# Altium footprint library custom-case.PcbLib: 342 footprints (part 6 of 22)
Each footprint in its own frame and in the unit in brackets; x right, y up, seen from the top. Pads: shape width x height; smd on the part's side, far side on the other; paste and mask are expansions set on the pad; w line width, h text height; cw(c..) or ccw(c..) is an arc to the next point about the centre after c.
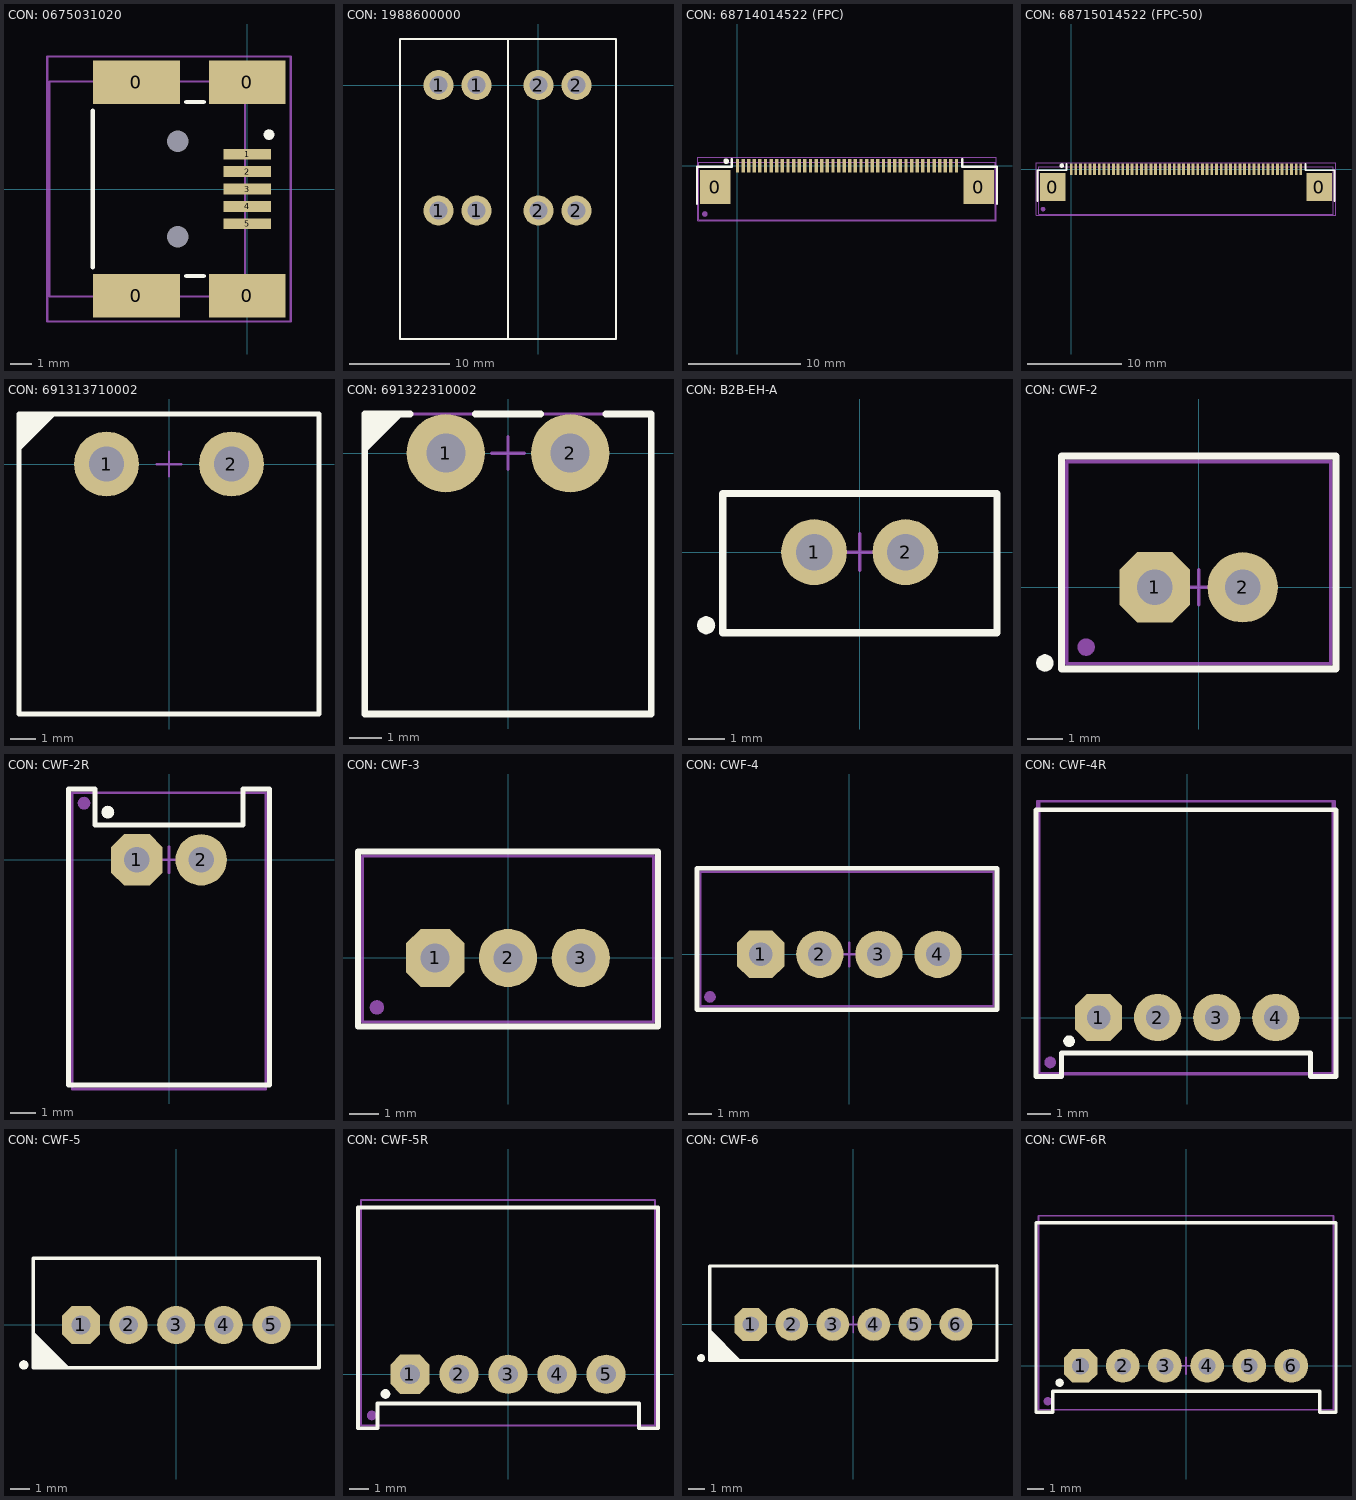
[diagram p5: the footprints below, top view; thin cyan lines are the x and y axes]

## CON: 0675031020 [mm]
pads (13):
  rect 4x2 smd: 0(-5.1,-4.9) 0(-5.1,4.9)
  rect 3.5x2 smd: 0(0,-4.9) 0(0,4.9)
  rect 2.2x0.5 smd: 1(0,1.6) 2(0,0.8) 3(0,0) 4(0,-0.8) 5(0,-1.6)
  round 0 hole 1: ""(-3.2,-2.2) ""(-3.2,2.2)
  round 0.5 on Mech1: ""(-0.6,4.5)
  round 0.5 on Top Overlay: ""(1,2.5)
Top Overlay:
  lines w0.2: -7.1,-3.6 -7.1,3.6 ; -2.8,-4 -2,-4 ; -2.8,4 -2,4
Top Assy:
  lines w0.1: -9.1,-4.95 -0.1,-4.95 -0.1,4.95 -9.1,4.95 -9.1,-4.95
Size Area:
  lines w0.1: -9.2,-6.1 2,-6.1 2,6.1 -9.2,6.1 -9.2,-6.1
3D body "675031020.stp": height 3.95, standoff -1, extent -9.1,-4.95 -0.1,4.95

## CON: 1988600000 [mm]
pads (8):
  round 3 hole 1.8: 1(-9.95,-12.5) 1(-9.95,0) 1(-6.15,-12.5) 1(-6.15,0) 2(0,-12.5) 2(0,0) 2(3.8,-12.5) 2(3.8,0)
Top Overlay:
  lines w0.2: -3.025,-25.3 -3.025,4.602 ; -13.812,-25.3 -13.812,4.602 7.762,4.602 7.762,-25.3 -13.812,-25.3
Top Assy:
  lines w0.1: -3.025,-25.3 -3.025,4.602 ; -13.812,-25.3 7.762,-25.3 7.762,4.602 -13.812,4.602 -13.812,-25.3
Size Area:
  lines w0.1: -13.812,-25.3 7.762,-25.3 7.762,4.602 -13.812,4.602 -13.812,-25.3
3D body "1988600000.stp": height 41.24, standoff -5, extent -13.812,-25.3 7.762,4.602

## CON: 68714014522 (FPC) [mm]
pads (44):
  rect 2.7x3 smd: 0(-1.975,-1.9) 0(21.475,-1.9)
  rect 0.3x1.2 smd: 1(0,0) 2(0.5,0) 3(1,0) 4(1.5,0) 5(2,0) 6(2.5,0) 7(3,0) 8(3.5,0) 9(4,0) 10(4.5,0) 11(5,0) 12(5.5,0) 13(6,0) 14(6.5,0) 15(7,0) 16(7.5,0) 17(8,0) 18(8.5,0) 19(9,0) 20(9.5,0) 21(10,0) 22(10.5,0) 23(11,0) 24(11.5,0) 25(12,0) 26(12.5,0) 27(13,0) 28(13.5,0) 29(14,0) 30(14.5,0) 31(15,0) 32(15.5,0) 33(16,0) 34(16.5,0) 35(17,0) 36(17.5,0) 37(18,0) 38(18.5,0) 39(19,0) 40(19.5,0)
  round 0.5 on Mech1: ""(-2.9,-4.3)
  round 0.5 on Top Overlay: ""(-1,0.4)
Top Overlay:
  lines w0.2: -3.6,-3.4 -3.6,-0.1 -0.5,-0.1 -0.5,0.6 ; 20,0.6 20,-0.1 23.1,-0.1 23.1,-3.4
Top Assy:
  lines w0.1: -3.45,-4.8 -3.45,0.3 22.95,0.3 22.95,-4.8 -3.45,-4.8
Size Area:
  lines w0.1: -3.55,-4.9 -3.55,0.75 23.05,0.75 23.05,-4.9 -3.55,-4.9
3D body "68714014522 (rev1).stp": height 2.1, standoff 0, extent -3.45,-4.8 22.95,0.3

## CON: 68715014522 (FPC-50) [mm]
pads (54):
  rect 2.7x3 smd: 0(-1.975,-1.9) 0(26.475,-1.9)
  rect 0.3x1.2 smd: 1(0,0) 2(0.5,0) 3(1,0) 4(1.5,0) 5(2,0) 6(2.5,0) 7(3,0) 8(3.5,0) 9(4,0) 10(4.5,0) 11(5,0) 12(5.5,0) 13(6,0) 14(6.5,0) 15(7,0) 16(7.5,0) 17(8,0) 18(8.5,0) 19(9,0) 20(9.5,0) 21(10,0) 22(10.5,0) 23(11,0) 24(11.5,0) 25(12,0) 26(12.5,0) 27(13,0) 28(13.5,0) 29(14,0) 30(14.5,0) 31(15,0) 32(15.5,0) 33(16,0) 34(16.5,0) 35(17,0) 36(17.5,0) 37(18,0) 38(18.5,0) 39(19,0) 40(19.5,0) 41(20,0) 42(20.5,0) 43(21,0) 44(21.5,0) 45(22,0) 46(22.5,0) 47(23,0) 48(23.5,0) 49(24,0) 50(24.5,0)
  round 0.5 on Mech1: ""(-3,-4.25)
  round 0.5 on Top Overlay: ""(-1,0.4)
Top Overlay:
  lines w0.2: -3.6,-3.4 -3.6,-0.1 -0.5,-0.1 -0.5,0.6 ; 25,0.6 25,-0.1 28.1,-0.1 28.1,-3.4
Top Assy:
  lines w0.1: -3.45,-4.8 27.95,-4.8 27.95,0.3 -3.45,0.3 -3.45,-4.8
Size Area:
  lines w0.1: -3.75,-4.9 -3.75,0.7 28.25,0.7 28.25,-4.9 -3.75,-4.9
3D body "68715014522 (rev1).stp": height 2.1, standoff 0, extent -3.45,-4.8 27.95,0.3

## CON: 691313710002 [mm]
pads (2):
  round 2.6 hole 1.4 mask+0.075: 1(-2.5,0) 2(2.5,0)
Top Overlay:
  region: -6,0.5 -4.5,2 -6,2
  lines w0.2: -6,-10 -6,2 6,2 6,-10 -6,-10
Top Assy:
  lines w0.1: -6,-10 -6,2 6,2 6,-10 -6,-10
Size Area:
  lines w0.1: -0.5,0 0.5,0 ; 0,-0.5 0,0.5 ; -6,-10 -6,2 6,2 6,-10 -6,-10
3D body "691313710002 (rev1).stp": height 9.25, standoff -2.75, extent -6,-10 6,2

## CON: 691322310002 [mm]
pads (2):
  round 2.4 hole 1.2 mask+0.075: 1(-1.905,0) 2(1.905,0)
Top Overlay:
  region: -4.4,0 -3.2,1.2 -4.4,1.2
  lines w0.2: -3,1.2 -4.4,1.2 -4.4,-8 4.4,-8 4.4,1.2 3,1.2 ; -1,1.2 1,1.2
Top Assy:
  lines w0.1: -4.4,-8 4.4,-8 4.4,1.2 -4.4,1.2 -4.4,-8
Size Area:
  lines w0.1: -0.5,0 0.5,0 ; 0,-0.5 0,0.5 ; -4.4,-8 -4.4,1.2 4.4,1.2 4.4,-8 -4.4,-8
3D body "691322310002 (rev1).stp": height 7.7, standoff -3, extent -4.405,-8 4.405,1.2

## CON: B2B-EH-A [mm]
pads (3):
  round 1.8 hole 1: 1(-1.25,0) 2(1.25,0)
  round 0.5 on Top Overlay: ""(-4.2,-2)
Top Overlay:
  lines w0.2: -3.75,-2.2 -3.75,1.6 3.75,1.6 3.75,-2.2 -3.75,-2.2
Top Assy:
  lines w0.1: -3.75,-2.2 -3.75,1.6 3.75,1.6 3.75,-2.2 -3.75,-2.2
Size Area:
  lines w0.1: -0.5,0 0.5,0 ; 0,-0.5 0,0.5 ; -3.75,-2.2 -3.75,1.6 3.75,1.6 3.75,-2.2 -3.75,-2.2
3D body "User Library-B2B-EH-A.STEP": height 6.05, standoff -3.15, extent -3.75,-2.2 3.75,1.6

## CON: CWF-2 [mm]
height 7.7
pads (4):
  oct 2x2 hole 1: 1(-1.25,0)
  round 2 hole 1: 2(1.25,0)
  round 0.5 on Top Overlay: ""(-4.375,-2.15)
  round 0.5 on Mech1: ""(-3.2,-1.7)
Top Overlay:
  lines w0.2: -3.9,-2.325 -3.9,3.725 3.9,3.725 3.9,-2.325 -3.9,-2.325
Top Assy:
  lines w0.1: -3.75,-2.175 3.75,-2.175 3.75,3.575 -3.75,3.575 -3.75,-2.175
Size Area:
  lines w0.1: -0.5,0 0.5,0 ; 0,-0.5 0,0.5 ; -3.9,-2.325 -3.9,3.725 3.9,3.725 3.9,-2.325 -3.9,-2.325
3D body "CWF-2.step": height 7, standoff -3.5, extent -3.75,-2.175 3.75,3.575

## CON: CWF-2R [mm]
height 7.7
pads (4):
  oct 2x2 hole 1: 1(-1.25,0)
  round 2 hole 1: 2(1.25,0)
  round 0.5 on Mech1: ""(-3.3,2.2)
  round 0.5 on Top Overlay: ""(-2.375,1.85)
Top Overlay:
  lines w0.2: -3.9,-8.75 -3.9,2.75 -2.875,2.75 -2.875,1.35 2.875,1.35 2.875,2.75 3.9,2.75 3.9,-8.75 -3.9,-8.75
Top Assy:
  lines w0.1: -3.75,-8.9 3.75,-8.9 3.75,2.6 -3.75,2.6 -3.75,-8.9
Size Area:
  lines w0.1: -0.5,0 0.5,0 ; 0,-0.5 0,0.5 ; -3.9,-8.75 3.9,-8.75 3.9,2.75 2.875,2.75 2.875,1.35 -2.875,1.35 -2.875,2.75 -3.9,2.75 -3.9,-8.75
3D body "User Library-DS1069-2 CWF-2R.STEP": height 5.85, standoff -3.4, extent -3.75,-8.9 3.75,2.6

## CON: CWF-3 [mm]
height 7.7
pads (4):
  oct 2x2 hole 1: 1(-2.5,0)
  round 2 hole 1: 2(0,0) 3(2.5,0)
  round 0.5 on Mech1: ""(-4.5,-1.7)
Top Overlay:
  lines w0.2: -5.15,-2.35 5.15,-2.35 5.15,3.65 -5.15,3.65 -5.15,-2.35
Top Assy:
  lines w0.1: -5,-2.2 -5,3.5 5,3.5 5,-2.2 -5,-2.2
Size Area:
  lines w0.1: -0.5,0 0.5,0 ; 0,-0.5 0,0.5 ; -5.15,-2.35 5.15,-2.35 5.15,3.65 -5.15,3.65 -5.15,-2.35
3D body "CWF-3.step": height 7, standoff -3.5, extent -5,-2.2 5,3.55

## CON: CWF-4 [mm]
height 7.7
pads (5):
  oct 2x2 hole 1: 1(-3.75,0)
  round 2 hole 1: 2(-1.25,0) 3(1.25,0) 4(3.75,0)
  round 0.5 on Mech1: ""(-5.9,-1.8)
Top Overlay:
  lines w0.2: -6.45,-2.35 6.25,-2.35 6.25,3.65 -6.45,3.65 -6.45,-2.35
Top Assy:
  lines w0.1: -6.3,-2.2 -6.3,3.5 6.1,3.5 6.1,-2.2 -6.3,-2.2
Size Area:
  lines w0.1: -0.5,0 0.5,0 ; 0,-0.5 0,0.5 ; -6.45,-2.35 6.25,-2.35 6.25,3.65 -6.45,3.65 -6.45,-2.35
3D body "CWF-4.step": height 7, standoff -3.5, extent -6.267,-2.194 6.133,3.556

## CON: CWF-4R [mm]
pads (6):
  oct 2x2 hole 1: 1(-3.75,0)
  round 2 hole 1: 2(-1.25,0) 3(1.25,0) 4(3.75,0)
  round 0.5 on Mech1: ""(-5.8,-1.9)
  round 0.5 on Top Overlay: ""(-5,-1)
Top Overlay:
  lines w0.2: -6.4,-2.5 -5.325,-2.5 -5.325,-1.5 5.225,-1.5 5.225,-2.5 6.3,-2.5 6.3,8.8 -6.4,8.8 -6.4,-2.5
Top Assy:
  lines w0.1: -6.25,-2.35 6.15,-2.35 6.15,9.15 -6.25,9.15 -6.25,-2.35
Size Area:
  lines w0.1: -6.35,-2.4 6.25,-2.4 6.25,9.15 -6.35,9.15 -6.35,-2.4
3D body "User Library-DS1069-4 MR TypeA.STEP": height 5.8, standoff -3.35, extent -6.25,-2.35 6.15,9.15

## CON: CWF-5 [mm]
pads (6):
  oct 2x2 hole 1: 1(-5,0)
  round 2 hole 1: 2(-2.5,0) 3(0,0) 4(2.5,0) 5(5,0)
  round 0.5 on Top Overlay: ""(-8,-2.1)
Top Overlay:
  region: -5.575,-2.25 -7.5,-0.325 -7.5,-2.25
  lines w0.2: -7.5,-2.25 7.5,-2.25 7.5,3.5 -7.5,3.5 -7.5,-2.25
Top Assy:
  lines w0.1: -7.5,-2.25 7.5,-2.25 7.5,3.5 -7.5,3.5 -7.5,-2.25
Size Area:
  lines w0.1: -0.5,0 0.5,0 ; 0,-0.5 0,0.5 ; -7.5,-2.25 7.5,-2.25 7.5,3.5 -7.5,3.5 -7.5,-2.25
3D body "User Library-CWF-5.STEP": height 7.05, standoff -3.45, extent -7.5,-2.25 7.5,3.5

## CON: CWF-5R [mm]
pads (7):
  oct 2x2 hole 1: 1(-5,0)
  round 2 hole 1: 2(-2.5,0) 3(0,0) 4(2.5,0) 5(5,0)
  round 0.5 on Mech1: ""(-6.95,-2.1)
  round 0.5 on Top Overlay: ""(-6.25,-1)
Top Overlay:
  lines w0.2: -7.65,-2.75 -6.65,-2.75 -6.65,-1.5 6.675,-1.5 6.675,-2.75 7.65,-2.75 7.65,8.5 -7.65,8.5 -7.65,-2.75
Top Assy:
  lines w0.1: -7.5,-2.6 -7.5,8.9 7.5,8.9 7.5,-2.6 -7.5,-2.6
Size Area:
  lines w0.1: -0.5,0 0.5,0 ; 0,-0.5 0,0.5 ; -7.5,-2.6 7.5,-2.6 7.5,8.9 -7.5,8.9 -7.5,-2.6
3D body "User Library-DS1069-5 CWF-5R.STEP": height 5.75, standoff -3.5, extent -7.5,-2.62 7.5,8.88

## CON: CWF-6 [mm]
pads (7):
  oct 2x2 hole 1: 1(-6.25,0)
  round 2 hole 1: 2(-3.75,0) 3(-1.25,0) 4(1.25,0) 5(3.75,0) 6(6.25,0)
  round 0.5 on Top Overlay: ""(-9.275,-2.05)
Top Overlay:
  region: -6.825,-2.2 -8.75,-0.275 -8.75,-2.2
  lines w0.2: -8.75,-2.2 8.75,-2.2 8.75,3.575 -8.75,3.55 -8.75,-2.2
Top Assy:
  lines w0.1: -8.75,-2.2 8.75,-2.2 8.75,3.575 -8.75,3.55 -8.75,-2.2
Size Area:
  lines w0.1: -0.5,0 0.5,0 ; 0,-0.5 0,0.5 ; -8.75,-2.2 8.75,-2.2 8.75,3.575 -8.75,3.55 -8.75,-2.2
3D body "User Library-CWF-6.STEP": height 7.05, standoff -3.45, extent -8.75,-2.2 8.75,3.55

## CON: CWF-6R [mm]
pads (8):
  oct 2x2 hole 1: 1(-6.25,0)
  round 2 hole 1: 2(-3.75,0) 3(-1.25,0) 4(1.25,0) 5(3.75,0) 6(6.25,0)
  round 0.5 on Mech1: ""(-8.2,-2.1)
  round 0.5 on Top Overlay: ""(-7.5,-1)
Top Overlay:
  lines w0.2: -8.9,-2.75 -7.9,-2.75 -7.9,-1.5 7.925,-1.5 7.925,-2.75 8.9,-2.75 8.9,8.5 -8.9,8.5 -8.9,-2.75
Top Assy:
  lines w0.1: -8.75,-2.6 -8.75,8.9 8.75,8.9 8.75,-2.6 -8.75,-2.6
Size Area:
  lines w0.1: -0.5,0 0.5,0 ; 0,-0.5 0,0.5 ; -8.75,-2.6 8.75,-2.6 8.75,8.9 -8.75,8.9 -8.75,-2.6
3D body "User Library-DS1069-6 CWF-6R.STEP": height 5.85, standoff -3.4, extent -8.75,-2.6 8.75,8.9